# Altium schematic symbol library ECS-TXO-20CSMV4-320-AY-TR.SchLib: 1 symbol
Pins are listed as number, name and electrical type; pins without a type are passive.

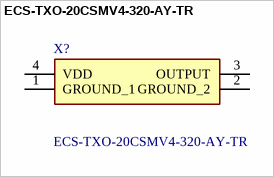
[diagram p0: symbol ECS-TXO-20CSMV4-320-AY-TR]

## ECS-TXO-20CSMV4-320-AY-TR
designator X?
XTAL OSC TCXO 32.0000MHZ CLPSW; Manufacturer_Name: ECS; Geometry.Height: 0.8mm; Farnell Part Number: *; Farnell Price/Stock: *; Manufacturer_Part_Number: ECS-TXO-20CSMV4-320-AY-TR; Datasheet Link: *
footprint ECSTXO20CSMV4320AYTR
pins: 1 GROUND_1, 2 GROUND_2, 3 OUTPUT, 4 VDD